# Altium footprint library PTS636_SK25_SMTR_LFS.PcbLib: 1 footprints
Each footprint in its own frame and in the unit in brackets; x right, y up, seen from the top. Pads: shape width x height; smd on the part's side, far side on the other; paste and mask are expansions set on the pad; w line width, h text height; cw(c..) or ccw(c..) is an arc to the next point about the centre after c.
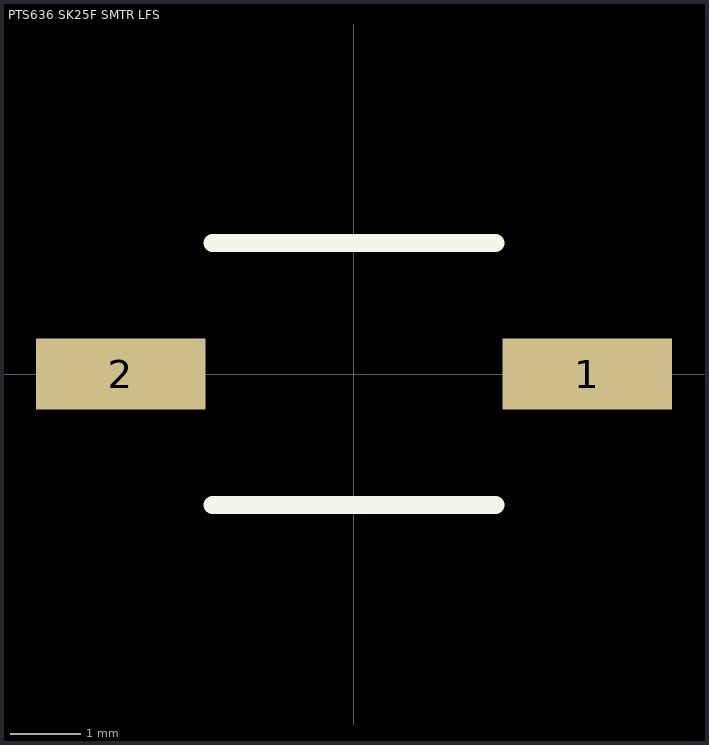
[diagram p0: the footprint, top view; thin cyan lines are the x and y axes]

## PTS636 SK25F SMTR LFS [mm]
pads (2):
  rect 2.4x1 smd: 1(3.3,0) 2(-3.3,0)
Top Overlay:
  lines w0.254: -2,-1.85 2,-1.85 ; -2,1.85 2,1.85